# EAGLE library part PBH4UEENAGVX (library PBH4UEENAGVX)
PUSHBUTTON, 100mA, 30VDC 4PDT, On-On Through Hole, Right Angle Source: Datasheet <https://configured-product-images.s3.amazonaws.com/2D/specs/PBH4UEENAGVX.pdf>
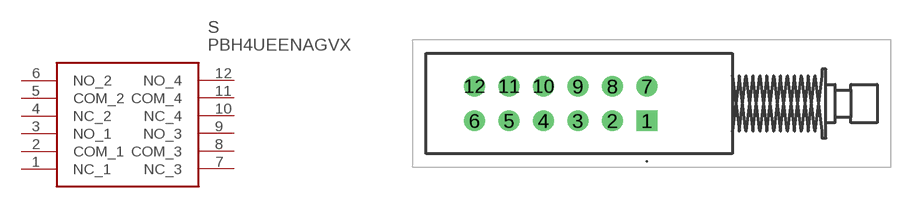
[diagram p0: symbol with the pads of PBH4UEENAGVX; footprint PBH4UEENAGVX]

Designator prefix S

## PBH4UEENAGVX (Description: PUSHBUTTON, 100mA, 30VDC 4PDT, On-On Through Hole, Right Angle; Height: 9.35mm; Manufacturer_Name: E-Switch; Manufacturer_Part_Number: PBH4UEENAGVX; Mouser_Part_Number: 612-PBH4UEENAGVX; Mouser_Price-Stock: https://www.mouser.co.uk/ProductDetail/E-Switch/PBH4UEENAGVX?qs=QtyuwXswaQg0AcsFcToR1A%3D%3D)  [PBH4UEENAGVX]
1  NC_1
2  COM_1
3  NO_1
4  NC_2
5  COM_2
6  NO_2
7  NC_3
8  COM_3
9  NO_3
10  NC_4
11  COM_4
12  NO_4

## Footprint PBH4UEENAGVX (pad centres in mm)
PBH4UEENAGVX-2
drill 1 pad 1.5 square: 1 0,0
drill 1 pad 1.5: 2 -2.5,0; 3 -5,0; 4 -7.5,0; 5 -10,0; 6 -12.5,0; 7 0,2.5; 8 -2.5,2.5; 9 -5,2.5; 10 -7.5,2.5; 11 -10,2.5; 12 -12.5,2.5